# Altium footprint library sod-323.PcbLib: 1 footprints
Each footprint in its own frame and in the unit in brackets; x right, y up, seen from the top. Pads: shape width x height; smd on the part's side, far side on the other; paste and mask are expansions set on the pad; w line width, h text height; cw(c..) or ccw(c..) is an arc to the next point about the centre after c.
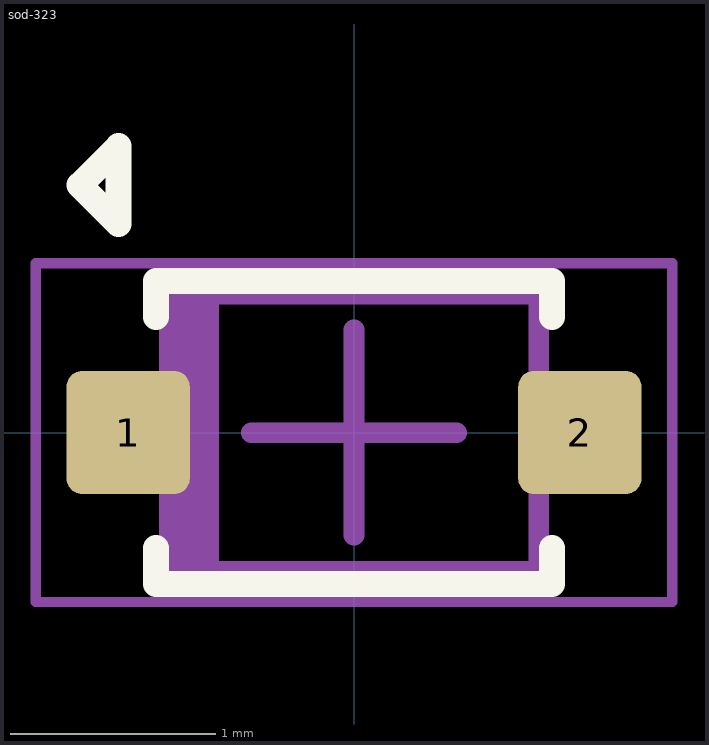
[diagram p0: the footprint, top view; thin cyan lines are the x and y axes]

## sod-323 [mm] "SOD-323, 2 leads, 1.7x1.25x1.1 mm"
height 1.1
pads (2):
  rrect25% 0.6x0.6 smd: 1(-1.1,0) 2(1.1,0)
Top Overlay:
  lines w0.127: -0.964,-0.563 -0.964,-0.738 0.964,-0.738 0.964,-0.563 ; -0.964,0.563 -0.964,0.738 0.964,0.738 0.964,0.563 ; -1.336,1.205 -1.147,1.395 -1.147,1.015 -1.336,1.205
Mechanical 13:
  rectangle: -0.9,-0.675 -0.658,0.675
  lines w0.1: -0.9,-0.675 -0.9,0.675 0.9,0.675 0.9,-0.675 -0.9,-0.675
Mechanical 15:
  lines w0.05: -1.55,-0.825 -1.55,0.825 1.55,0.825 1.55,-0.825 -1.55,-0.825
  lines w0.1: -0.5,0 0.5,0 ; 0,-0.5 0,0.5
3D body "sod-323.stp": height 0.94, standoff 0, extent -1.244,-0.625 1.244,0.625